# EAGLE library part SI4455 (library madhu)
Easy-to-use, low-current OOK/(G)FSK sub-GHz transceiver 284-960 MHz, -116 dBm sensitivity 1.2 kbps - 500 kbps
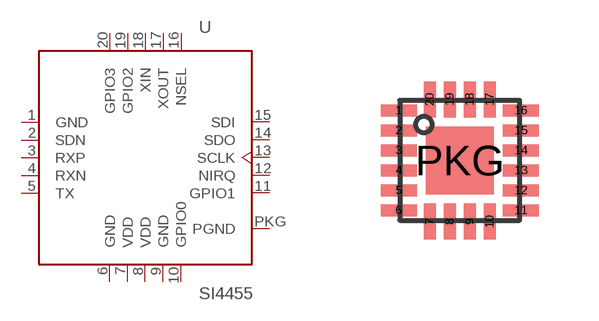
[diagram p18: symbol with the pads of QFN20-3X3; footprint QFN20-3X3]

Designator prefix U

## SI4455-C  [QFN20-3X3]
1  GND  pwr
2  SDN  in
3  RXP  in
4  RXN  in
5  TX  out
6  GND  pwr
7  VDD  pwr
8  VDD  pwr
9  GND  pwr
10  GPIO0
11  GPIO1
12  NIRQ  out
13  SCLK  in
14  SDO  out
15  SDI  in
16  NSEL  in
17  XOUT  out
18  XIN  in
19  GPIO2
20  GPIO3
PKG  PGND  pwr

## Footprint QFN20-3X3 (pad centres in mm)
20 pin QFN 3mm x 3mm
smd 0.9 x 0.3: 1 -1.53,1.25; 2 -1.53,0.75; 3 -1.53,0.25; 4 -1.53,-0.25; 5 -1.53,-0.75; 6 -1.53,-1.25; 11 1.53,-1.25; 12 1.53,-0.75; 13 1.53,-0.25; 14 1.53,0.25; 15 1.53,0.75; 16 1.53,1.25
smd 0.3 x 0.9: 7 -0.75,-1.53; 8 -0.25,-1.53; 9 0.25,-1.53; 10 0.75,-1.53; 17 0.75,1.53; 18 0.25,1.53; 19 -0.25,1.53; 20 -0.75,1.53
smd 1.7 x 1.7: PKG 0,0